# Altium footprint library Socket.PcbLib: 3 footprints
Each footprint in its own frame and in the unit in brackets; x right, y up, seen from the top. Pads: shape width x height; smd on the part's side, far side on the other; paste and mask are expansions set on the pad; w line width, h text height; cw(c..) or ccw(c..) is an arc to the next point about the centre after c.
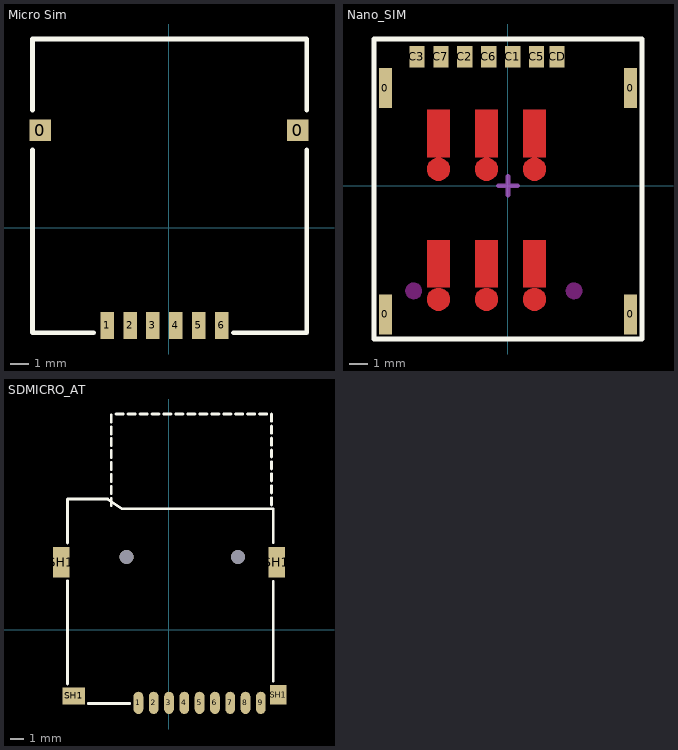
[diagram p0: the footprints below, top view; thin cyan lines are the x and y axes]

## Micro Sim [mm] "MS-OL-6P-V2"
pads (8):
  rect 1.2x1.2 smd mask+0.102: 0(-7.15,5.415) 0(7.15,5.415)
  rect 0.75x1.5 smd mask+0.102: 1(-3.43,-5.415) 2(-2.16,-5.415) 3(-0.89,-5.415) 4(0.38,-5.415) 5(1.65,-5.415) 6(2.92,-5.415)
Top Overlay:
  lines w0.254: -7.571,-5.824 -7.571,4.326 ; -7.571,6.526 -7.571,10.475 7.629,10.475 7.63,10.475 7.63,6.526 ; -7.571,-5.825 -4.172,-5.825 ; 3.577,-5.825 7.629,-5.825 7.63,-5.824 7.63,4.326
Top Designator:
  text ".Designator" at -3.71,1.824 h1.52
3D body "XKNANO-1308.stp": height 1.8, standoff 0.05, extent -7.572,-5.824 7.628,10.476

## Nano_SIM [mm] "XKNANO-113"
pads (11):
  rect 0.7x2.1 smd mask+0.102: 0(-6.5,-6.825) 0(-6.5,5.175) 0(6.5,-6.825) 0(6.5,5.175)
  rect 0.8x1.14 smd mask+0.102: C1(0.25,6.825) C2(-2.29,6.825) C3(-4.83,6.825) C5(1.52,6.825) C6(-1.02,6.825) C7(-3.56,6.825) CD(2.597,6.825)
Top Layer:
  pour cut-out: 0.8,-5.385 0.8,-2.885 2,-2.885 2,-5.385
  pour cut-out: -1.74,-5.385 -1.74,-2.885 -0.54,-2.885 -0.54,-5.385
  pour cut-out: -4.28,-5.385 -4.28,-2.885 -3.08,-2.885 -3.08,-5.385
  pour cut-out: -3.68,-6.625 -3.799,-6.625 -4.02,-6.534 -4.189,-6.365 -4.28,-6.144 -4.28,-6.025 -4.28,-5.906 -4.189,-5.685 -4.02,-5.516 -3.799,-5.425 -3.68,-5.425 -3.561,-5.425 -3.34,-5.516 -3.171,-5.685 -3.08,-5.906 -3.08,-6.025 -3.08,-6.144 -3.171,-6.365 -3.34,-6.534 -3.561,-6.625
  pour cut-out: -1.74,-6.025 -1.74,-6.144 -1.649,-6.365 -1.48,-6.534 -1.259,-6.625 -1.14,-6.625 -1.021,-6.625 -0.8,-6.534 -0.631,-6.365 -0.54,-6.144 -0.54,-6.025 -0.54,-5.906 -0.631,-5.685 -0.8,-5.516 -1.021,-5.425 -1.14,-5.425 -1.259,-5.425 -1.48,-5.516 -1.649,-5.685 -1.74,-5.906
  pour cut-out: 0.8,-6.025 0.8,-6.144 0.891,-6.365 1.06,-6.534 1.281,-6.625 1.4,-6.625 1.519,-6.625 1.74,-6.534 1.909,-6.365 2,-6.144 2,-6.025 2,-5.906 1.909,-5.685 1.74,-5.516 1.519,-5.425 1.4,-5.425 1.281,-5.425 1.06,-5.516 0.891,-5.685 0.8,-5.906
  pour cut-out: 0.8,1.515 0.8,4.015 2,4.015 2,1.515
  pour cut-out: -1.74,1.515 -1.74,4.015 -0.54,4.015 -0.54,1.515
  pour cut-out: -4.28,1.515 -4.28,4.015 -3.08,4.015 -3.08,1.515
  pour cut-out: -3.68,0.275 -3.799,0.275 -4.02,0.366 -4.189,0.535 -4.28,0.756 -4.28,0.875 -4.28,0.994 -4.189,1.215 -4.02,1.384 -3.799,1.475 -3.68,1.475 -3.561,1.475 -3.34,1.384 -3.171,1.215 -3.08,0.994 -3.08,0.875 -3.08,0.756 -3.171,0.535 -3.34,0.366 -3.561,0.275
  pour cut-out: -1.74,0.875 -1.74,0.756 -1.649,0.535 -1.48,0.366 -1.259,0.275 -1.14,0.275 -1.021,0.275 -0.8,0.366 -0.631,0.535 -0.54,0.756 -0.54,0.875 -0.54,0.994 -0.631,1.215 -0.8,1.384 -1.021,1.475 -1.14,1.475 -1.259,1.475 -1.48,1.384 -1.649,1.215 -1.74,0.994
  pour cut-out: 0.8,0.875 0.8,0.756 0.891,0.535 1.06,0.366 1.281,0.275 1.4,0.275 1.519,0.275 1.74,0.366 1.909,0.535 2,0.756 2,0.875 2,0.994 1.909,1.215 1.74,1.384 1.519,1.475 1.4,1.475 1.281,1.475 1.06,1.384 0.891,1.215 0.8,0.994
Top Overlay:
  lines w0.254: -7.1,-8.125 -7.1,-4.925 -7.1,7.775 6.7,7.775 7.1,7.775 7.1,-8.125 -7.1,-8.125
Keep-Out Layer:
  board cut-out: 3.1,-5.575 3.1,-5.655 3.161,-5.802 3.273,-5.914 3.42,-5.975 3.5,-5.975 3.58,-5.975 3.727,-5.914 3.839,-5.802 3.9,-5.655 3.9,-5.575 3.9,-5.495 3.839,-5.348 3.727,-5.236 3.58,-5.175 3.5,-5.175 3.42,-5.175 3.273,-5.236 3.161,-5.348 3.1,-5.495
  board cut-out: -5,-5.975 -5.08,-5.975 -5.227,-5.914 -5.339,-5.802 -5.4,-5.655 -5.4,-5.575 -5.4,-5.495 -5.339,-5.348 -5.227,-5.236 -5.08,-5.175 -5,-5.175 -4.92,-5.175 -4.773,-5.236 -4.661,-5.348 -4.6,-5.495 -4.6,-5.575 -4.6,-5.655 -4.661,-5.802 -4.773,-5.914 -4.92,-5.975
Keep-Out Layer:
  circle w0.1: c3.5,-5.575 r0.4
  circle w0.1: c-5,-5.575 r0.4
Top Designator:
  text ".Designator" at -3.71,-0.519 h1.52
Mechanical 15:
  lines w0.254: -0.5,0 0.5,0 ; 0,-0.5 0,0.5

## SDMICRO_AT [mm] "SDMICRO exist on Iran, Attend 112J-TDAR-R01 push-push"
height 1
pads (15):
  oval 0.7x1.6 smd: 1(-2.2,-5.25) 2(-1.1,-5.25) 3(0,-5.25) 4(1.1,-5.25) 5(2.2,-5.25) 6(3.3,-5.25) 7(4.4,-5.25) 8(5.5,-5.25) 9(6.6,-5.25)
  rect 1.2x2.2 smd: SH1(-7.75,4.85) SH1(7.75,4.85)
  rect 1.6x1.2 smd: SH1(-6.85,-4.75)
  rect 1.2x1.4 smd: SH1(7.85,-4.65)
  round 1 hole 1 unplated: ""(-3.05,5.25) ""(4.95,5.25)
Top Overlay:
  lines w0.2: -7.3,-3.9 -7.3,3.53 ; -7.3,6.25 -7.3,9.4 -4.409,9.4 -3.399,8.7 7.5,8.7 7.5,6.26 ; -5.8,-5.3 -2.82,-5.3 ; -4.16,8.93 -4.16,9.45 ; -4.16,9.79 -4.16,10.31 ; -4.16,10.65 -4.16,11.17 ; -4.16,11.51 -4.16,12.03 ; -4.16,12.37 -4.16,12.89 ; -4.16,13.23 -4.16,13.75 ; -4.16,14.09 -4.16,14.61 ; -4.16,14.95 -4.16,15.47 ; -3.81,15.52 -3.29,15.52 ; -2.95,15.52 -2.43,15.52 ; -2.09,15.52 -1.57,15.52 ; -1.23,15.52 -0.71,15.52 ; -0.37,15.52 0.15,15.52 ; 0.49,15.52 1.01,15.52 ; 1.35,15.52 1.87,15.52 ; 2.21,15.52 2.73,15.52 ; 3.07,15.52 3.59,15.52 ; 3.93,15.52 4.45,15.52 ; 4.79,15.52 5.31,15.52 ; 5.65,15.52 6.17,15.52 ; 6.51,15.52 7.03,15.52 ; 7.37,8.98 7.37,9.5 ; 7.37,9.84 7.37,10.36 ; 7.37,10.7 7.37,11.22 ; 7.37,11.56 7.37,12.08 ; 7.37,12.42 7.37,12.94 ; 7.37,13.28 7.37,13.8 ; 7.37,14.14 7.37,14.66 ; 7.37,15 7.37,15.52 ; 7.5,-3.7 7.5,3.5
Top Designator:
  text ".Designator" at -3.66,4.39 h1.52
3D body "User Library-Micro_SD.step": height 1.15, standoff 0.17, extent -3.976,-1.179 7.024,13.821
3D body "112J-TXAR-R_C_1.stp": height 1.85, standoff -0.6, extent -8,-5.703 8.1,9.3